# EAGLE library part 6210XX242921_621032242921 (library WR-PHD)
WR-PHD 2.00 mm Dual SMT Socket Header Bottom Entry Article Properties Pins 4 unitless; 6 unitless; 8 unitless; 10 unitless; 14 unitless; 16 unitless; 20 unitless; 24 unitless; 32 unitless; 44 unitless General Information Operating Temperature -40 °C up to +105 °C Compliance Lead free / RoHS Pitch 2 mm Durability 50 Cycles Rows Dual Gender Socket Header Type Straight Material Properties Insulator Material PA9T Insulator Flammability Rating UL94 V-0 Contact Material Copper Alloy Contact Plating Gold Contact Type Stamped Certification UL Approval E323964 Packaging Properties Packaging Tape and Reel with Cap; Tube Electrical Properties IR 2 A Withstanding Voltage 500 V (AC) Contact Resistance 20 mΩ RISO 1000 MΩ <https://www.we-online.com/components/media/o57956v209%20Family_Dual_Socket_Header_WR-PHD_6130xx242921.jpg> Details see: www.we-online.com/en/components/products/PHD_2_00_SMT_DUAL_SOCKET_HEADER_6210XX242921 <www.we-online.com/en/components/products/PHD_2_00_SMT_DUAL_SOCKET_HEADER_6210XX242921/?utm_source=eagle_model&utm_medium=description_link&utm_campaign=eisos_eagle> Updated by Ella 2024-01-31 2024 (C) Würth Elektronik
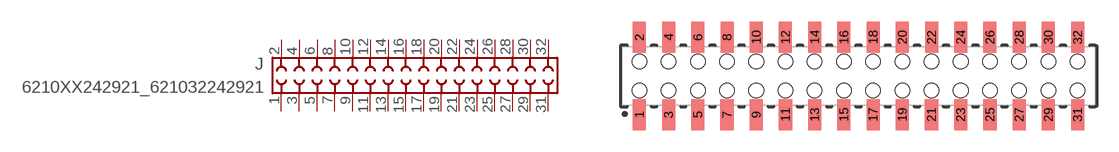
[diagram p343: symbol with the pads of 621032242921; footprint 621032242921]

Designator prefix J

## 6210XX242921_621032242921 (DATASHEET-URL: https://www.we-online.com/redexpert/spec/621032242921?ae; GENDER: Socket Header; IR: 2A; MOUNT: SMT; PACKAGING: Tube; PART-NUMBER: 621032242921; PINS: 32; PITCH: 2.00 mm; ROWS: Dual; TYPE: Straight; VALUE: 621032242921)  [621032242921]
1  1  pas
2  2  pas
3  3  pas
4  4  pas
5  5  pas
6  6  pas
7  7  pas
8  8  pas
9  9  pas
10  10  pas
11  11  pas
12  12  pas
13  13  pas
14  14  pas
15  15  pas
16  16  pas
17  17  pas
18  18  pas
19  19  pas
20  20  pas
21  21  pas
22  22  pas
23  23  pas
24  24  pas
25  25  pas
26  26  pas
27  27  pas
28  28  pas
29  29  pas
30  30  pas
31  31  pas
32  32  pas

## Footprint 621032242921 (pad centres in mm)
WR-PHD 2.00 mm Dual SMT Socket Header,32 Pins
smd 0.9 x 2.1: 1 -15,-2.65; 3 -13,-2.65; 5 -11,-2.65; 7 -9,-2.65; 9 -7,-2.65; 11 -5,-2.65; 13 -3,-2.65; 15 -1,-2.65; 17 1,-2.65; 19 3,-2.65; 21 5,-2.65; 23 7,-2.65; 25 9,-2.65; 27 11,-2.65; 29 13,-2.65; 31 15,-2.65
smd 0.89 x 2.1: 2 -15,2.65; 4 -13,2.65; 6 -11,2.65; 8 -9,2.65; 10 -7,2.65; 12 -5,2.65; 14 -3,2.65; 16 -1,2.65; 18 1,2.65; 20 3,2.65; 22 5,2.65; 24 7,2.65; 26 9,2.65; 28 11,2.65; 30 13,2.65; 32 15,2.65
hole 1 at -15,1
hole 1 at -13,1
hole 1 at -13,-1
hole 1 at -15,-1
hole 1 at -11,1
hole 1 at -11,-1
hole 1 at -9,-1
hole 1 at -9,1
hole 1 at -7,1
hole 1 at -7,-1
hole 1 at -5,-1
hole 1 at -3,-1
hole 1 at -3,1
hole 1 at -5,1
hole 1 at -1,1
hole 1 at 1,1
hole 1 at 1,-1
hole 1 at -1,-1
hole 1 at 3,1
hole 1 at 3,-1
hole 1 at 5,1
hole 1 at 7,1
hole 1 at 7,-1
hole 1 at 5,-1
hole 1 at 9,1
hole 1 at 11,1
hole 1 at 11,-1
hole 1 at 9,-1
hole 1 at 13,1
hole 1 at 13,-1
hole 1 at 15,-1
hole 1 at 15,1